# Altium footprint library custom-case.PcbLib: 483 footprints (part 10 of 31)
Each footprint in its own frame and in the unit in brackets; x right, y up, seen from the top. Pads: shape width x height; smd on the part's side, far side on the other; paste and mask are expansions set on the pad; w line width, h text height; cw(c..) or ccw(c..) is an arc to the next point about the centre after c.
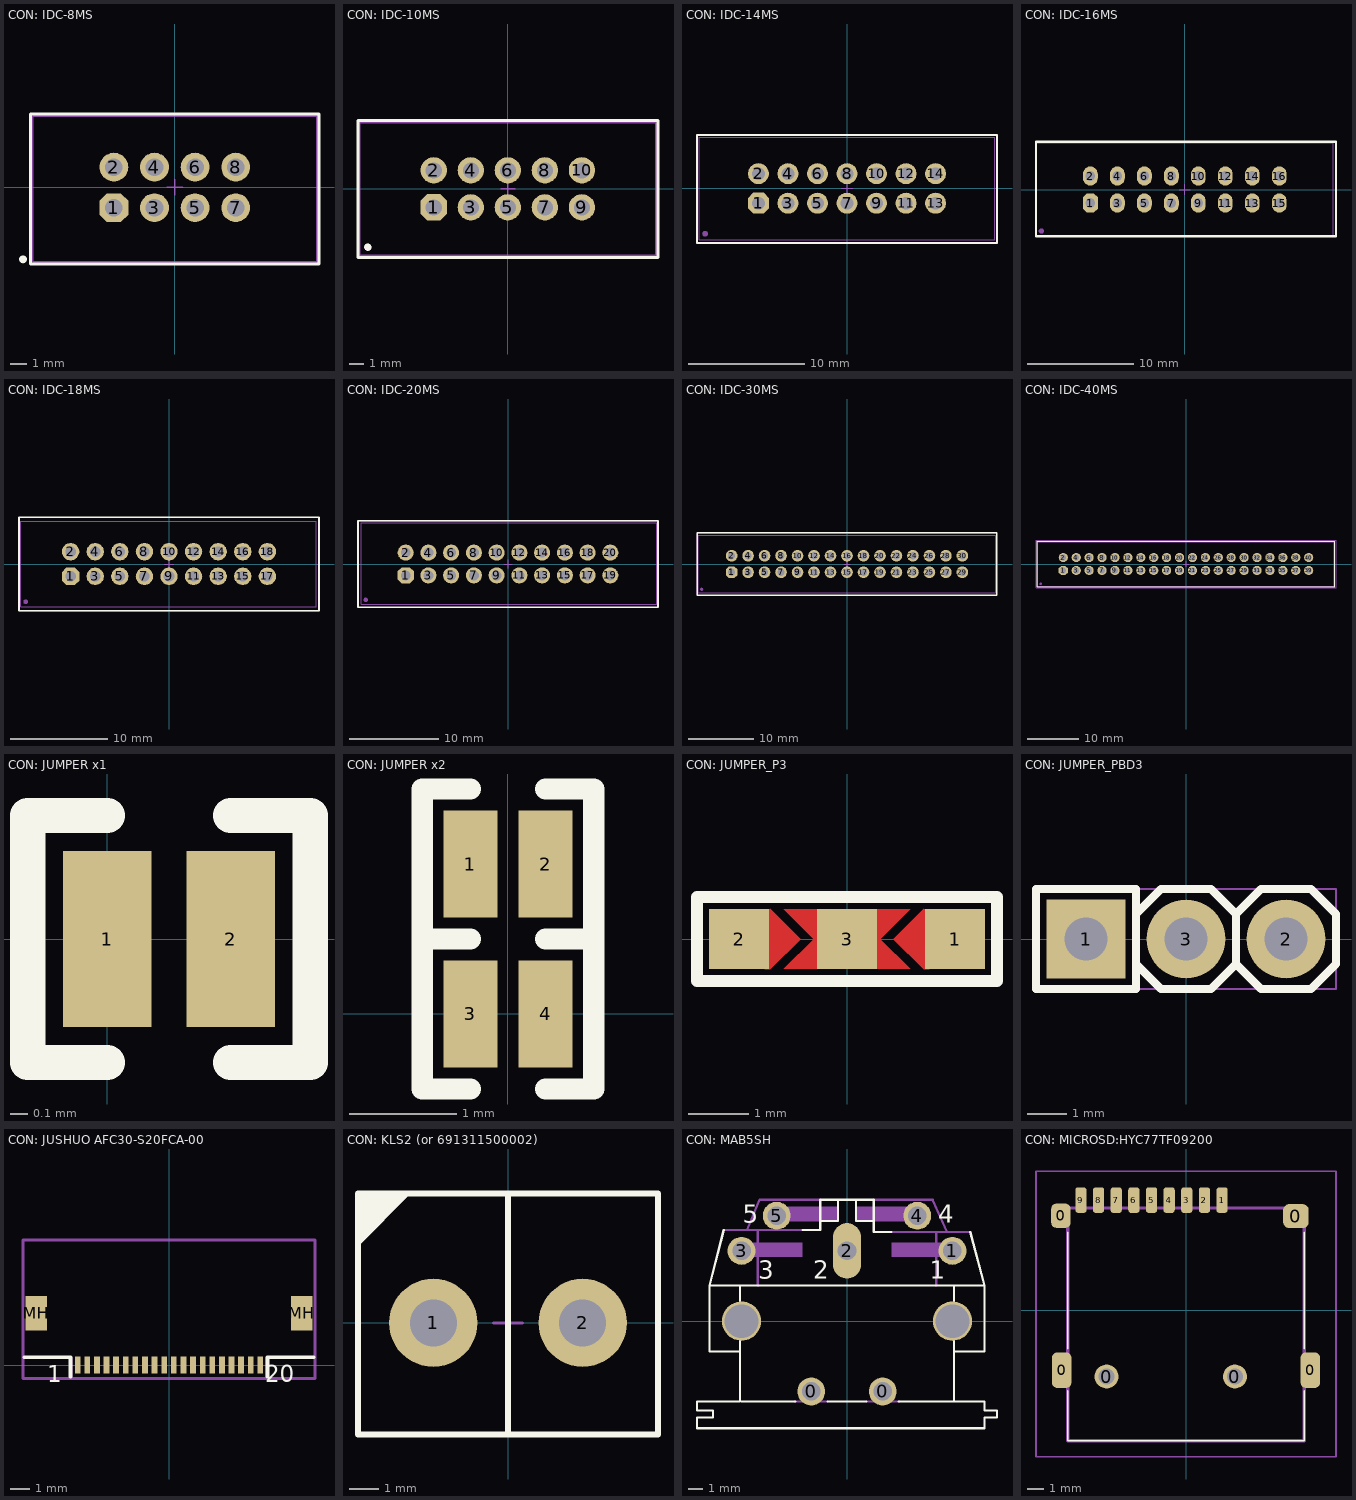
[diagram p9: the footprints below, top view; thin cyan lines are the x and y axes]

## CON: IDC-8MS [mm]
height 10
pads (9):
  oct 1.8x1.8 hole 1.1: 1(-3.81,-1.27)
  round 1.8 hole 1.1: 2(-3.81,1.27) 3(-1.27,-1.27) 4(-1.27,1.27) 5(1.27,-1.27) 6(1.27,1.27) 7(3.81,-1.27) 8(3.81,1.27)
  round 0.5 on Top Overlay: ""(-9.5,-4.5)
Top Overlay:
  lines w0.2: -9.025,-4.8 9.025,-4.8 9.025,4.6 -9.025,4.6 -9.025,-4.8
Top Assy:
  lines w0.1: -8.89,-4.65 8.89,-4.65 8.89,4.45 -8.89,4.45 -8.89,-4.65
Size Area:
  lines w0.1: -0.5,0 0.5,0 ; 0,-0.5 0,0.5 ; -8.975,-4.75 8.975,-4.75 8.975,4.55 -8.975,4.55 -8.975,-4.75
3D body "6666.STEP": height 8.9, standoff -3.2, extent -8.89,-4.65 8.89,4.45

## CON: IDC-10MS [mm] "IDC-10MS 10 pin PCB-mount header"
height 10
pads (12):
  oct 1.8x1.8 hole 1.1: 1(-5.08,-1.27)
  round 1.8 hole 1.1: 2(-5.08,1.27) 3(-2.54,-1.27) 4(-2.54,1.27) 5(0,-1.27) 6(0,1.27) 7(2.54,-1.27) 8(2.54,1.27) 9(5.08,-1.27) 10(5.08,1.27)
  round 0.5 on Mech1: ""(-9.6,-4)
  round 0.5 on Top Overlay: ""(-9.6,-4)
Top Overlay:
  lines w0.2: -10.275,-4.7 -10.275,4.675 10.3,4.675 10.3,-4.7 -10.275,-4.7
Top Assy:
  lines w0.1: -10.14,-4.572 10.16,-4.572 10.16,4.528 -10.14,4.528 -10.14,-4.572
Size Area:
  lines w0.1: -0.5,0 0.5,0 ; 0,-0.5 0,0.5 ; -10.225,-4.65 -10.225,4.625 10.25,4.625 10.25,-4.65 -10.225,-4.65
3D body "IDC-10MS.STEP": height 9, standoff -3.1, extent -10.14,-4.572 10.16,4.528

## CON: IDC-14MS [mm] "IDC-14MS connector"
height 9
pads (15):
  oct 1.8x1.8 hole 1.1: 1(-7.62,-1.27)
  round 1.8 hole 1.1: 2(-7.62,1.27) 3(-5.08,-1.27) 4(-5.08,1.27) 5(-2.54,-1.27) 6(-2.54,1.27) 7(0,-1.27) 8(0,1.27) 9(2.54,-1.27) 10(2.54,1.27) 11(5.08,-1.27) 12(5.08,1.27) 13(7.62,-1.27) 14(7.62,1.27)
  round 0.5 on Mech1: 38(-12.2,-3.9)
Top Overlay:
  lines w0.2: -12.9,-4.7 -12.9,4.6 12.9,4.6 12.9,-4.7 -12.9,-4.7
Top Assy:
  lines w0.1: -12.7,-4.4 12.7,-4.4 12.7,4.4 -12.7,4.4 -12.7,-4.4
Size Area:
  lines w0.1: -0.5,0 0.5,0 ; 0,-0.5 0,0.5 ; -12.9,-4.7 -12.9,4.6 12.9,4.6 12.9,-4.7 -12.9,-4.7
3D body "IDC-14MS.STEP": height 9.1, standoff -3, extent -12.715,-4.4 12.715,4.4

## CON: IDC-16MS [mm] "IDC-16MS straight leads pcb mount"
height 9
pads (17):
  oct 1.4x1.8 hole 0.9: 1(-8.89,-1.27)
  oval 1.4x1.8 hole 0.9: 2(-8.89,1.27) 3(-6.35,-1.27) 4(-6.35,1.27) 5(-3.81,-1.27) 6(-3.81,1.27) 7(-1.27,-1.27) 8(-1.27,1.27) 9(1.27,-1.27) 10(1.27,1.27) 11(3.81,-1.27) 12(3.81,1.27) 13(6.35,-1.27) 14(6.35,1.27) 15(8.89,-1.27) 16(8.89,1.27)
  round 0.5 on Mech1: 39(-13.5,-3.9)
Top Overlay:
  lines w0.2: -14,-4.4 -14,4.5 14.224,4.5 14.224,-4.4 -14,-4.4
Top Assy:
  lines w0.1: -13.985,-4.4 13.985,-4.4 13.985,4.4 -13.985,4.4 -13.985,4.285 -13.985,-4.4
Size Area:
  lines w0.1: -0.5,0 0.5,0 ; 0,-0.5 0,0.5 ; -14,-4.4 -14,4.5 14.224,4.5 14.224,-4.4 -14,-4.4
3D body "IDC-16MS.STEP": height 9.1, standoff -3, extent -13.985,-4.4 13.985,4.4

## CON: IDC-18MS [mm]
height 10
pads (19):
  oct 1.8x1.8 hole 1.1: 1(-10.16,-1.27)
  round 1.8 hole 1.1: 2(-10.16,1.27) 3(-7.62,-1.27) 4(-7.62,1.27) 5(-5.08,-1.27) 6(-5.08,1.27) 7(-2.54,-1.27) 8(-2.54,1.27) 9(0,-1.27) 10(0,1.27) 11(2.54,-1.27) 12(2.54,1.27) 13(5.08,-1.27) 14(5.08,1.27) 15(7.62,-1.27) 16(7.62,1.27) 17(10.16,-1.27) 18(10.16,1.27)
  round 0.5 on Mech1: 40(-14.8,-3.9)
Top Overlay:
  lines w0.2: -15.494,-4.826 -15.494,4.826 15.494,4.826 15.494,-4.826 -15.494,-4.826
Top Assy:
  lines w0.1: -15.3,-4.4 15.2,-4.4 15.2,4.4 -15.3,4.4 -15.3,-4.4
Size Area:
  lines w0.1: -0.5,0 0.5,0 ; 0,-0.5 0,0.5 ; -15.494,-4.826 -15.494,4.826 15.494,4.826 15.494,-4.826 -15.494,-4.826
3D body "IDC-18MS.STEP": height 10.54, standoff -1, extent -15.28,-4.378 15.23,4.422

## CON: IDC-20MS [mm]
height 10
pads (21):
  oct 1.8x1.8 hole 1.1: 1(-11.43,-1.27)
  round 1.8 hole 1.1: 2(-11.43,1.27) 3(-8.89,-1.27) 4(-8.89,1.27) 5(-6.35,-1.27) 6(-6.35,1.27) 7(-3.81,-1.27) 8(-3.81,1.27) 9(-1.27,-1.27) 10(-1.27,1.27) 11(1.27,-1.27) 12(1.27,1.27) 13(3.81,-1.27) 14(3.81,1.27) 15(6.35,-1.27) 16(6.35,1.27) 17(8.89,-1.27) 18(8.89,1.27) 19(11.43,-1.27) 20(11.43,1.27)
  round 0.5 on Mech1: 41(-15.9,-4)
Top Overlay:
  lines w0.2: -16.764,-4.826 -16.764,4.826 16.764,4.826 16.764,-4.826 -16.764,-4.826
Top Assy:
  lines w0.1: -16.4,-4.5 16.6,-4.5 16.6,4.6 -16.4,4.6 -16.4,-4.5
Size Area:
  lines w0.1: -0.5,0 0.5,0 ; 0,-0.5 0,0.5 ; -16.764,-4.826 -16.764,4.826 16.764,4.826 16.764,-4.826 -16.764,-4.826
3D body "IDC-20MS.STEP": height 9, standoff -3, extent -16.43,-4.52 16.57,4.58

## CON: IDC-30MS [mm]
height 10
pads (31):
  oct 1.8x1.8 hole 1.1: 1(-17.78,-1.27)
  round 1.8 hole 1.1: 2(-17.78,1.27) 3(-15.24,-1.27) 4(-15.24,1.27) 5(-12.7,-1.27) 6(-12.7,1.27) 7(-10.16,-1.27) 8(-10.16,1.27) 9(-7.62,-1.27) 10(-7.62,1.27) 11(-5.08,-1.27) 12(-5.08,1.27) 13(-2.54,-1.27) 14(-2.54,1.27) 15(0,-1.27) 16(0,1.27) 17(2.54,-1.27) 18(2.54,1.27) 19(5.08,-1.27) 20(5.08,1.27) 21(7.62,-1.27) 22(7.62,1.27) 23(10.16,-1.27) 24(10.16,1.27) 25(12.7,-1.27) 26(12.7,1.27) 27(15.24,-1.27) 28(15.24,1.27) 29(17.78,-1.27) 30(17.78,1.27)
  round 0.5 on Mech1: 42(-22.4,-3.9)
Top Overlay:
  lines w0.2: -23.114,-4.826 -23.114,4.826 23.114,4.826 23.114,-4.826 -23.114,-4.826
Top Assy:
  lines w0.1: -22.9,-4.4 22.9,-4.4 22.9,4.4 -22.9,4.4 -22.9,-4.4
Size Area:
  lines w0.1: -0.5,0 0.5,0 ; 0,-0.5 0,0.5 ; -23.114,-4.826 -23.114,4.826 23.114,4.826 23.114,-4.826 -23.114,-4.826
3D body "IDC-30MS.STEP": height 8.78, standoff -3, extent -22.881,-4.392 22.869,4.408

## CON: IDC-40MS [mm]
height 10
pads (41):
  oct 1.8x1.8 hole 1.1: 1(-24.13,-1.27)
  round 1.8 hole 1.1: 2(-24.13,1.27) 3(-21.59,-1.27) 4(-21.59,1.27) 5(-19.05,-1.27) 6(-19.05,1.27) 7(-16.51,-1.27) 8(-16.51,1.27) 9(-13.97,-1.27) 10(-13.97,1.27) 11(-11.43,-1.27) 12(-11.43,1.27) 13(-8.89,-1.27) 14(-8.89,1.27) 15(-6.35,-1.27) 16(-6.35,1.27) 17(-3.81,-1.27) 18(-3.81,1.27) 19(-1.27,-1.27) 20(-1.27,1.27) 21(1.27,-1.27) 22(1.27,1.27) 23(3.87,-1.27) 24(3.81,1.27) 25(6.35,-1.27) 26(6.35,1.27) 27(8.89,-1.27) 28(8.89,1.27) 29(11.43,-1.27) 30(11.43,1.27) 31(13.97,-1.27) 32(13.97,1.27) 33(16.51,-1.27) 34(16.51,1.27) 35(19.05,-1.27) 36(19.05,1.27) 37(21.59,-1.27) 38(21.59,1.27) 39(24.13,-1.27) 40(24.13,1.27)
  round 0.5 on Mech1: 43(-28.6,-3.9)
Top Overlay:
  lines w0.2: -29.3,-4.5 29.3,-4.5 29.3,4.5 -29.3,4.5 -29.3,-4.5
Top Assy:
  lines w0.1: -29.2,-4.4 -29.2,4.4 29.2,4.4 29.2,-4.4 -29.2,-4.4
Size Area:
  lines w0.1: -0.5,0 0.5,0 ; 0,-0.5 0,0.5 ; -29.5,-4.7 29.5,-4.7 29.5,4.7 -29.5,4.7 -29.5,-4.7
3D body "IDC-40MS.STEP": height 8.78, standoff -3, extent -29.225,-4.4 29.225,4.4

## CON: JUMPER x1 [mm]
pads (2):
  rect 0.5x1 smd: 1(0,0) 2(0.7,0)
Top Overlay:
  lines w0.2: 0,-0.7 -0.45,-0.7 -0.45,0.7 0,0.7 ; 0.7,-0.7 1.15,-0.7 1.15,0.7 0.7,0.7

## CON: JUMPER x2 [mm]
pads (4):
  rect 0.5x1 smd: 1(-0.35,1.4) 2(0.35,1.4) 3(-0.35,0) 4(0.35,0)
Top Overlay:
  lines w0.2: -0.35,-0.7 -0.8,-0.7 -0.8,0.7 ; -0.35,2.1 -0.8,2.1 -0.8,0.7 ; 0.35,-0.7 0.8,-0.7 0.8,0.7 ; 0.35,2.1 0.8,2.1 0.8,0.7 ; -0.8,0.7 -0.35,0.7 -0.8,0.7 ; 0.8,0.7 0.35,0.7 0.8,0.7

## CON: JUMPER_P3 [mm]
pads (3):
  rect 1x1 smd: 1(1.8,0) 2(-1.8,0) 3(0,0)
Top Layer:
  region: -1.375,-0.5 -1.275,-0.5 -0.775,0 -1.275,0.5 -1.375,0.5
  region: -1.05,-0.5 -0.55,0 -1.05,0.5 -0.45,0.5 -0.45,-0.5
  region: 1.375,-0.5 1.275,-0.5 0.775,0 1.275,0.5 1.375,0.5
  region: 1.05,-0.5 0.55,0 1.05,0.5 0.45,0.5 0.45,-0.5
Top Overlay:
  lines w0.2: -2.5,-0.7 -2.5,0.7 2.5,0.7 2.5,-0.7 -2.5,-0.7
Top Solder:
  region: 1.2,-0.6 -1.2,-0.6 -1.2,0.6 1.2,0.6
Top Assy:
  lines w0.1: -2.5,-0.7 2.5,-0.7 2.5,0.7 -2.5,0.7 -2.5,-0.7

## CON: JUMPER_PBD3 [mm]
pads (3):
  rect 2x2 hole 1.1: 1(-2.54,0)
  round 2 hole 1.1: 2(2.54,0) 3(0,0)
Top Overlay:
  lines w0.2: -1.27,-0.635 -0.635,-1.27 0.635,-1.27 1.27,-0.635 ; -1.27,0.635 -0.635,1.27 0.635,1.27 1.27,0.635 ; 1.27,-0.635 1.27,0.635 ; 1.27,-0.635 1.905,-1.27 3.175,-1.27 3.81,-0.635 3.81,0.635 3.175,1.27 1.905,1.27 1.27,0.635 ; -3.81,-1.27 -3.81,1.27 -1.27,1.27 -1.27,-1.27 -3.81,-1.27
Top Assy:
  lines w0.1: -1.27,-0.635 -0.635,-1.27 0.635,-1.27 1.27,-0.635 ; -1.27,0.635 -0.635,1.27 0.635,1.27 1.27,0.635 ; 1.27,-0.635 1.905,-1.27 3.175,-1.27 3.81,-0.635 3.81,0.635 3.175,1.27 1.905,1.27 1.27,0.635 ; 1.27,-0.635 1.27,0.635 ; -3.81,-1.27 -1.27,-1.27 -1.27,1.27 -3.81,1.27 -3.81,-1.27
Size Area:
  lines w0.05: -3.81,-1.27 3.81,-1.27 3.81,1.27 -3.81,1.27 -3.81,-1.27
  lines w0.1: -0.5,0 0.5,0 ; 0,-0.5 0,0.5
3D body "PLS-3.STEP": height 8.54, standoff -3, extent -3.81,-1.27 3.81,1.27

## CON: JUSHUO AFC30-S20FCA-00 [mm] "FPC 20pin connector"
pads (22):
  rect 0.3x0.9 smd mask+0.075: 1(-4.75,0) 2(-4.25,0) 3(-3.75,0) 4(-3.25,0) 5(-2.75,0) 6(-2.25,0) 7(-1.75,0) 8(-1.25,0) 9(-0.75,0) 10(-0.25,0) 11(0.25,0) 12(0.75,0) 13(1.25,0) 14(1.75,0) 15(2.25,0) 16(2.75,0) 17(3.25,0) 18(3.75,0) 19(4.25,0) 20(4.75,0)
  rect 1.1x1.8 smd mask+0.075: MH(-6.9,2.7) MH(6.9,2.7)
Top Overlay:
  lines w0.2: -7.525,0.4 -5.125,0.4 -5.125,-0.6 ; 5.125,-0.6 5.125,0.4 7.525,0.4
  text "20" at 5.012,-1.195 h1.5
  text "1" at -6.344,-1.195 h1.5
Top Assy:
  lines w0.15: -7.6,-0.7 0,-0.7 7.6,-0.7 7.6,0.4 7.6,6.5 0,6.5 -7.6,6.5 -7.6,0.4 -7.6,-0.7
Size Area:
  lines w0.15: -7.6,0.4 -5.1,0.4 -5.1,-0.7 0,-0.7 5.1,-0.7 5.1,0.4 7.6,0.4 7.6,6.5 0,6.5 -7.6,6.5 -7.6,0.4
3D body "WR-FPC connector, 20pin, 0.5mm SMT ZIF Horizontal.STEP": height 2.2, standoff -0.07, extent -7.055,0.05 7.055,6.55

## CON: KLS2 (or 691311500002) [mm]
pads (2):
  round 3 hole 1.6 mask+0.075: 1(-2.54,0) 2(2.54,0)
Top Overlay:
  region: -5.1,2.6 -3.3,4.4 -5.1,4.4
  lines w0.2: 0,-3.8 0,4.4 ; -5.1,-3.8 5.1,-3.8 5.1,4.4 -5.1,4.4 -5.1,-3.8
Top Assy:
  lines w0.1: -5.1,-3.8 5.1,-3.8 5.1,4.4 -5.1,4.4 -5.1,-3.8
Size Area:
  lines w0.1: -0.5,0 0.5,0 ; 0,-0.5 0,0.5 ; -5.1,-3.8 5.1,-3.8 5.1,4.4 -5.1,4.4 -5.1,-3.8
3D body "691311500002 (rev1).stp": height 12.1, standoff -3.9, extent -5.1,-3.8 5.06,4.7

## CON: MAB5SH [mil] "MIDI"
pads (9):
  round 78 hole 52: 0(-100,-196.85) 0(100,-196.85) 1(295.28,196.85) 3(-295.28,196.85) 4(196.85,295.28) 5(-196.85,295.28)
  oval 78x156 hole 52: 2(0,196.85)
  round 110 hole 94.49 unplated: ""(-295.28,0) ""(295.28,0)
Top Overlay:
  lines w6: -345,255 -385,100 ; -300,-55 -300,-85 ; -300,55 -300,100 ; -295,-225 -145,-225 ; -125,255 -75,255 -75,280 ; -55,-225 55,-225 ; 125,250 75,250 75,280 ; 145,-225 300,-225 ; 300,-55 300,-85 ; 300,55 300,100 ; 345,250 385,100 ; -385,100 -385,-85 -300,-85 ; -385,100 -300,100 ; -300,-85 -300,-225 -420,-225 -420,-250 -375,-250 -375,-270 -420,-270 -420,-300 385,-300 385,-270 420,-270 420,-250 385,-250 385,-225 300,-225 ; -300,100 -75,100 75,100 300,100 ; -75,280 -25,280 -25,340 ; -75,280 -75,340 -25,340 ; -25,340 25,340 ; 25,340 25,280 75,280 ; 25,340 75,340 75,280 ; 300,-225 300,-85 ; 300,-85 385,-85 385,100 ; 300,100 385,100
  text "1" at 232.28,118.11 h50
  text "3" at -248.03,118.11 h50
  text "5" at -291.34,275.59 h50
  text "4" at 255.91,275.59 h50
  text "2" at -94.49,118.11 h50
3D model:
  region: -125,180 -315,180 -315,220 -125,220
  region: -25,280 -215,280 -215,320 -25,320
  region: 215,280 25,280 25,320 215,320
  region: 315,180 125,180 125,220 315,220
  lines w6: -345,255 -280,255 ; -300,-55 -300,55 ; -250,100 -250,255 ; -145,-225 -55,-225 ; -125,255 -250,255 ; -75,340 -245,340 -280,255 ; 55,-225 145,-225 ; 75,340 240,340 280,250 ; 125,250 250,250 ; 250,100 250,250 ; 300,-55 300,55 ; 345,250 280,250 ; -280,255 -250,255 ; 250,250 280,250
3D body "step_temp.STEP": height 830.71, standoff -153.54, extent -417.32,-295.28 417.32,342.52

## CON: MICROSD:HYC77TF09200 [mm]
pads (15):
  rrect50% 1.2x1.5 smd: 0(-7.8,5.9)
  rrect50% 1.2x2.2 smd: 0(-7.75,-3.725) 0(7.75,-3.725)
  round 1.5 hole 1: 0(-4.95,-4.125) 0(3.05,-4.125)
  rrect50% 1.6x1.5 smd: 0(6.85,5.875)
  rrect50% 0.7x1.6 smd: 1(2.25,6.875) 2(1.15,6.875) 3(0.05,6.875) 4(-1.05,6.875) 5(-2.15,6.875) 6(-3.25,6.875) 7(-4.35,6.875) 8(-5.45,6.875) 9(-6.55,6.875)
Top Overlay:
  lines w0.1: -7.375,-5 -7.375,-8.125 7.375,-8.125 7.375,-5 ; -7.375,-2.375 -7.375,4.875 ; 7.375,-2.375 7.375,4.875
3D model:
  lines w0.2: -7.375,-8.125 -7.375,6.375 7.375,6.375 7.375,-8.125 -7.375,-8.125
Size Area:
  lines w0.1: -9.35,-9.125 -9.35,8.675 9.35,8.675 9.35,-9.125 -9.35,-9.125
3D body "MicroSD_Slot.STEP": height 1.85, standoff -0.59, extent -8,-10.7 8,7.2